# Altium footprint library PBH4UEENAGVX.PcbLib: 1 footprints
Each footprint in its own frame and in the unit in brackets; x right, y up, seen from the top. Pads: shape width x height; smd on the part's side, far side on the other; paste and mask are expansions set on the pad; w line width, h text height; cw(c..) or ccw(c..) is an arc to the next point about the centre after c.
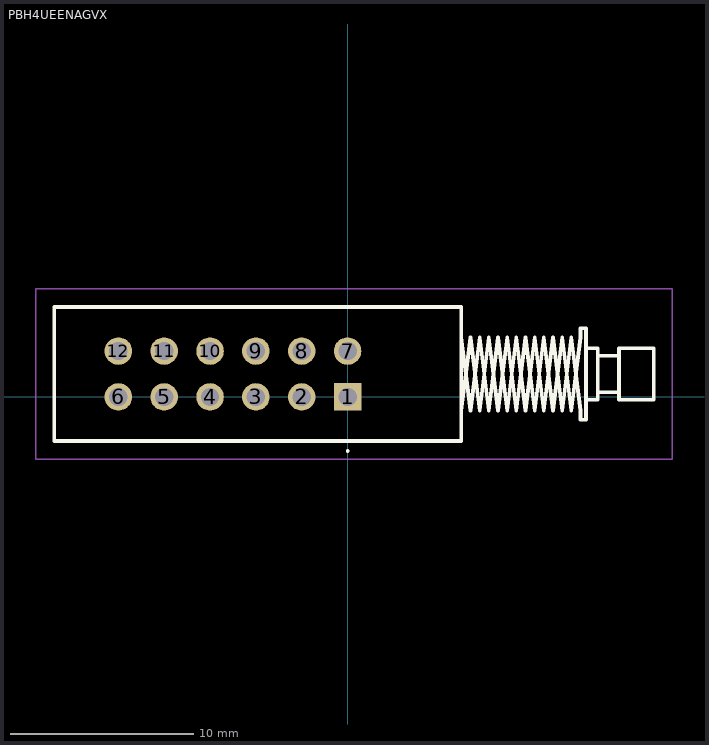
[diagram p0: the footprint, top view; thin cyan lines are the x and y axes]

## PBH4UEENAGVX [mm]
pads (12):
  rect 1.5x1.5 hole 1: 1(0,0)
  round 1.5 hole 1: 2(-2.5,0) 3(-5,0) 4(-7.5,0) 5(-10,0) 6(-12.5,0) 7(0,2.5) 8(-2.5,2.5) 9(-5,2.5) 10(-7.5,2.5) 11(-10,2.5) 12(-12.5,2.5)
Top Overlay:
  lines w0.1: 0,-3 0,-3 ; 0,-3 ccw(c0,-2.95) 0,-2.9 ; 0,-3 cw(c0,-2.95) 0,-2.9 ; 0,-2.9 0,-2.9
  lines w0.2: 6.2,-0.75 6.7,3.25 7.2,-0.75 7.7,3.25 8.2,-0.75 8.7,3.25 9.2,-0.75 9.7,3.25 10.2,-0.75 10.7,3.25 11.2,-0.75 11.7,3.25 12.2,-0.75 12.7,3.25 12.7,3.75 13,3.75 13,-1.25 12.7,-1.25 12.7,-0.75 12.2,3.25 11.7,-0.75 11.2,3.25 10.7,-0.75 10.2,3.25 9.7,-0.75 9.2,3.25 8.7,-0.75 8.2,3.25 7.7,-0.75 7.2,3.25 6.7,-0.75 6.2,3.25 ; 13,-0.15 13.65,-0.15 13.65,2.65 13,2.65 ; 13.65,0.25 14.8,0.25 ; 13.65,2.25 14.8,2.25 ; 14.8,0.25 14.8,2.25 ; 14.8,0.25 14.8,-0.15 16.7,-0.15 16.7,2.65 14.8,2.65 14.8,2.25 ; -16,-2.4 6.2,-2.4 6.2,4.9 -16,4.9 -16,-2.4
Mechanical 15:
  lines w0.1: 6.2,-0.75 6.7,3.25 7.2,-0.75 7.7,3.25 8.2,-0.75 8.7,3.25 9.2,-0.75 9.7,3.25 10.2,-0.75 10.7,3.25 11.2,-0.75 11.7,3.25 12.2,-0.75 12.7,3.25 12.7,3.75 13,3.75 13,-1.25 12.7,-1.25 12.7,-0.75 12.2,3.25 11.7,-0.75 11.2,3.25 10.7,-0.75 10.2,3.25 9.7,-0.75 9.2,3.25 8.7,-0.75 8.2,3.25 7.7,-0.75 7.2,3.25 6.7,-0.75 6.2,3.25 ; 13,-0.15 13.65,-0.15 13.65,2.65 13,2.65 ; 13.65,0.25 14.8,0.25 ; 13.65,2.25 14.8,2.25 ; 14.8,0.25 14.8,2.25 ; 14.8,0.25 14.8,-0.15 16.7,-0.15 16.7,2.65 14.8,2.65 14.8,2.25 ; -16,-2.4 6.2,-2.4 6.2,4.9 -16,4.9 -16,-2.4
Mechanical 20:
  lines w0.1: -17,-3.4 17.7,-3.4 17.7,5.9 -17,5.9 -17,-3.4